# Altium schematic symbol library EG2104_BSC011N03LSI.SCHLIB: 15 symbols
Pins are listed as number, name and electrical type; pins without a type are passive.

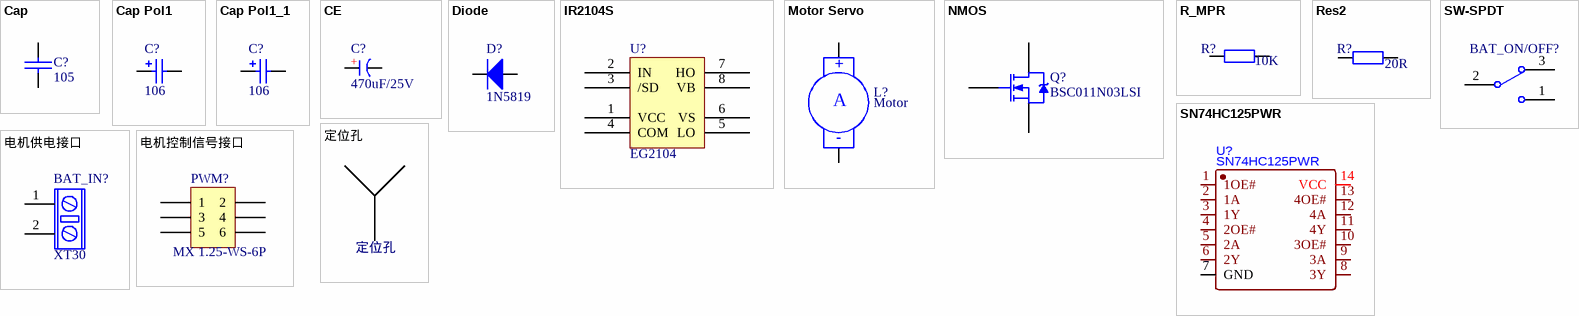
[diagram p0: symbols Cap to 电机控制信号接口]

## Cap
designator C?, comment 105
Capacitor
footprint RAD0.2
footprint RAD0.3
footprint 0805
footprint 0805 电容 C3
footprint 3216
pins: 1, 2

## Cap Pol1
designator C?, comment 106
Polarized Capacitor (Radial); Published: 8-Jun-2000; LatestRevisionDate: 17-Jul-2002; LatestRevisionNote: Re-released for DXP Platform.; PackageReference: RB7.6-15; Publisher: Altium Limited; PackageDescription: Polarized Capacitor (Radial); 2 Leads
simulation model CAP (Capacitor)
signal-integrity model Cap Pol
footprint 1206C
footprint 1206
footprint 0805
footprint 3216
footprint 0803 电容 C3
footprint 0805 电容 C3
pins: 1, 2
1 alternate drawing of the same symbol

## Cap Pol1_1
designator C?, comment value 106  (hidden comment: 10uF)
Polarized Capacitor (Radial); Published: 8-Jun-2000; LatestRevisionDate: 17-Jul-2002; LatestRevisionNote: Re-released for DXP Platform.; PackageReference: RB7.6-15; Publisher: Altium Limited; PackageDescription: Polarized Capacitor (Radial); 2 Leads
simulation model CAP (Capacitor)
signal-integrity model Cap Pol
footprint 1206C
footprint 1206
footprint 0805
footprint 0805 电容 C3
footprint 0803 电容 C3
footprint 3216
pins: 1, 2
1 alternate drawing of the same symbol

## CE
designator C?, comment 470uF/25V
footprint CAP 3.5*8*11.5 - BK (脚距3.5mm直径8mm高度11.5mm)
footprint CS 5.0*10*13 - V (脚距5mm , 直径10mm , 高13mm)
pins: 1 A, 2 K
text: +

## Diode
designator D?, comment 1N5819
Default Diode; PackageVersion: Sep-1996; PackageDescription: DO-214-AB/SMC; 2 C-Bend Leads; Body 7.9 x 5.9 mm, inc. leads (LxW); Code_JEDEC: DO-214-AB
simulation model DIODE (Diode)
footprint SMA(1206)
footprint 1206C
footprint SS14
footprint SOD-323
footprint LED_0603
footprint SSD-323
footprint DO-214  贴片二极管
pins: 1 A, 2 K

## IR2104S
designator U?, comment EG2104
footprint IR2104 (SOIC, 8-Leads, Body 5.0x4.0mm (max), Pitch 1.27mm, IPC Medium Density)
footprint SO8NB
pins: 1 VCC, 2 IN, 3 /SD, 4 COM, 5 LO, 6 VS, 7 HO, 8 VB

## Motor Servo
designator L?, comment Motor
Servo Motor
footprint KF301-2P
footprint 5.08 2P 螺钉端子 (Terminal Block, 17.5A 400V, Pitch 5.08mm, 2 Positions, Screw Connection)
footprint XT30 母头 电源插头
pins: 1 +, 2 -
text: A

## NMOS
designator Q?, comment BSC011N03LSI
N-Channel Power MOSFET 40V 100A 1.8mΩ; Note: Pin 2 is electrically connected to pin 4.; Published: 8-Jun-2000; LatestRevisionDate: 17-Jul-2002; LatestRevisionNote: Re-released for DXP Platform.; DatasheetVersion: PD-9.814; PackageVersion: Feb-1997; PackageReference: TO-220AB; Publisher: Altium Limited; PackageDescription: TO, Thru-Hole, Vertical, Heatsink Mounted; 3 In-Line Leads; Pitch 2.54 mm; ComponentLink1Description: Manufacturer Link; ComponentLink1URL: http://www.irf.com/
simulation model IRF1010 (Spice Subcircuit)
footprint PSON-8 MOS
footprint PSON-8 MOS
pins: 1 S, 2 G, 3 D

## R_MPR
designator R?, comment 10K
5W无感水泥电阻; BOM名称: 大功率电阻; 版权归属: 封装库来自淘宝 ID：黄晶宝石; 联系售后: https://shop463601444.taobao.com
footprint RX10-18*15*5 (18*15*5MM(长*宽*厚))
footprint R 0603_M
footprint R 0603_L
footprint 0603 电容 C3
pins: 1, 2

## Res2
designator R?, comment 20R
Resistor; Published: 8-Jun-2000; LatestRevisionDate: 17-Jul-2002; LatestRevisionNote: Re-released for DXP Platform.; PackageReference: AXIAL-0.4; Publisher: Altium Limited; PackageDescription: Axial Device, Thru-Hole; 2 Leads; 0.4 in Pin Spacing
simulation model RESISTOR (Resistor)
signal-integrity model Res
footprint 0603
footprint 0805(2012)
footprint 0805
footprint 0603 电容 C3
footprint R0603
pins: 1, 2

## SN74HC125PWR
designator U?
footprint TSSOP14_N (5*6.4*1mm（长宽高）封装库来自淘宝卖家 ID：黄晶宝石)
pins: 1 1OE#, 2 1A, 3 1Y, 4 2OE#, 5 2A, 6 2Y, 7 GND, 8 3Y, 9 3A, 10 3OE#, 11 4Y, 12 4A, 13 4OE#, 14 VCC

## SW-SPDT
designator BAT_ON/OFF?  (value not drawn)
SPDT Subminiature Toggle Switch, Right Angle Mounting, Vertical Actuation; Published: 24-Mar-1999; LatestRevisionDate: 17-Dec-2003; LatestRevisionNote: Schematic revised, PCB Footprint replaced.; DatasheetVersion: 05-Dec-2000; PackageReference: TL36WW15050; Publisher: Altium Limited; PackageDescription: Switch; 4 Leads; ComponentLink1Description: Manufacturer Link; ComponentLink1URL: http://www.apem.com
footprint MTS-102S 两档纽子开关 (MTS10系列3脚扭子开关)
pins: 1, 2, 3

## 定位孔
designator *?
footprint M3x7 铜柱+星孔 (M3铜柱，长：7mm，螺纹长：6mm)
footprint MTGP720H320V6P - duplicate

## 电机供电接口
designator BAT_IN?, comment XT30
footprint XT60 母头 电源接口
footprint TX60PW-F20 (长：18.8mm， 宽：16mm，高：8.6mm)
footprint TX60PW-M20 (长：18.8mm， 宽：16mm，高：8.6mm     淘宝ID:黄晶宝石)
footprint 5.08 2P 螺钉端子 (Terminal Block, 17.5A 400V, Pitch 5.08mm, 2 Positions, Screw Connection)
footprint XT30 母头 电源插头
pins: 1, 2

## 电机控制信号接口
designator PWM?, comment MX 1.25-WS-6P
footprint MX 1.25-WS-6P (长：12.65mm，宽：4.2mm，高：3.4mm)
pins: 1 (power), 2 (power), 3 (power), 4 (power), 5 (power), 6 (power)